# Altium footprint library SmartDoorLock.PcbLib: 9 footprints
Each footprint in its own frame and in the unit in brackets; x right, y up, seen from the top. Pads: shape width x height; smd on the part's side, far side on the other; paste and mask are expansions set on the pad; w line width, h text height; cw(c..) or ccw(c..) is an arc to the next point about the centre after c.
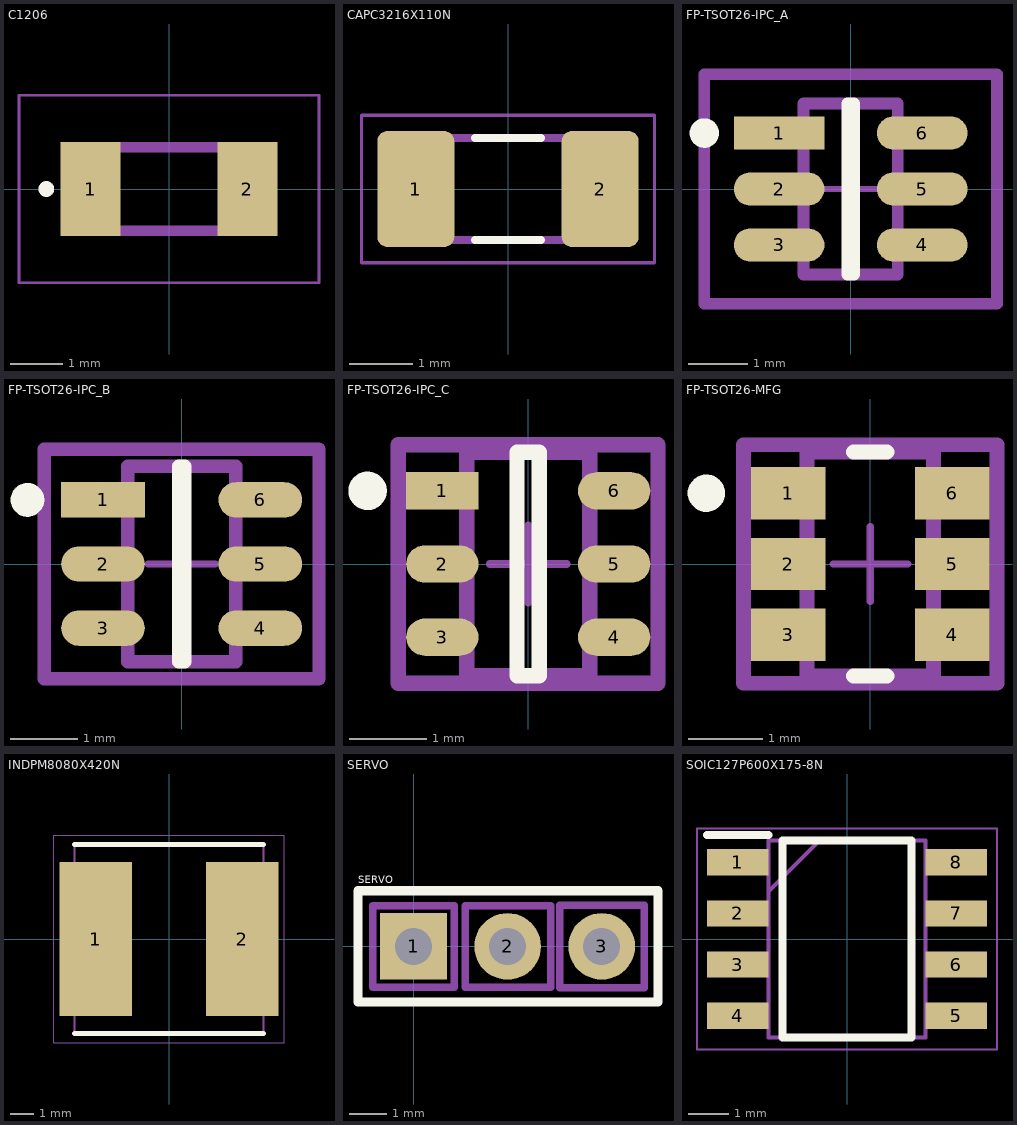
[diagram p0: the footprints below, top view; thin cyan lines are the x and y axes]

## C1206 [mm]
pads (2):
  rect 1.15x1.8 smd: 1(-1.5,0) 2(1.5,0)
Top Overlay:
  circle w0.2: c-2.35,0 r0.05
Top 3D Body:
  lines w0.2: -1.6,-0.8 -1.6,0.8 1.6,0.8 1.6,-0.8 -1.6,-0.8
Top Courtyard:
  lines w0.05: -2.875,-1.8 -2.875,1.8 2.875,1.8 2.875,-1.8 -2.875,-1.8
3D body "C1206C106M8PACTU.stp": height 1.8, standoff 0, extent -1.7,-0.9 1.7,0.9

## CAPC3216X110N [mm]
pads (2):
  rrect25% 1.21x1.82 smd: 1(-1.45,0) 2(1.45,0)
Top Overlay:
  lines w0.127: -0.52,-0.8 0.52,-0.8 ; -0.52,0.8 0.52,0.8
Top 3D Body:
  lines w0.127: -1.6,-0.8 1.6,-0.8 1.6,0.8 -1.6,0.8 -1.6,-0.8
Top Courtyard:
  lines w0.05: -2.305,-1.16 2.305,-1.16 2.305,1.16 -2.305,1.16 -2.305,-1.16
3D body "step_temp.STEP": height 0.85, standoff 0, extent -1.6,-0.8 1.6,0.8

## FP-TSOT26-IPC_A [mm]
pads (6):
  rect 1.54x0.566 smd paste+0 mask+0: 1(-1.216,0.95)
  rrect100% 1.54x0.566 smd paste+0 mask+0: 2(-1.216,0) 3(-1.216,-0.95) 4(1.216,-0.95) 5(1.216,0) 6(1.216,0.95)
Top Overlay:
  circle w0.25: c-2.485,0.95 r0.125
  lines w0.2: -0.054,-1.45 -0.054,1.45 0.054,1.45 0.054,-1.45 -0.054,-1.45
Top Assembly:
  lines w0.2: -2.485,-1.95 2.485,-1.95 2.485,1.95 -2.485,1.95 -2.485,-1.95
  text ".Designator" at 0,0.188 h1
Top 3D Body:
  lines w0.2: -0.8,-1.45 0.8,-1.45 0.8,1.45 -0.8,1.45 -0.8,-1.45
Top Courtyard:
  lines w0.2: -2.485,-1.95 2.485,-1.95 2.485,1.95 -2.485,1.95 -2.485,-1.95
Top Component Center:
  lines w0.1: -0.5,0 0.5,0 ; 0,-0.5 0,0.5
3D body "IC_Diodes_Inc_AP63201WU-7_eec.STEP": height 0.25, standoff 0, extent -2.485,-1.95 2.485,1.95

## FP-TSOT26-IPC_B [mm]
pads (6):
  rect 1.24x0.526 smd paste+0 mask+0: 1(-1.165,0.95)
  rrect100% 1.24x0.526 smd paste+0 mask+0: 2(-1.165,0) 3(-1.165,-0.95) 4(1.166,-0.95) 5(1.166,0) 6(1.166,0.95)
Top Overlay:
  circle w0.25: c-2.285,0.95 r0.125
  lines w0.2: -0.046,-1.45 0.046,-1.45 0.046,1.45 -0.046,1.45 -0.046,-1.45
Top Assembly:
  lines w0.2: -2.035,-1.7 2.035,-1.7 2.035,1.7 -2.035,1.7 -2.035,-1.7
  text ".Designator" at 0,0.188 h1
Top 3D Body:
  lines w0.2: -0.8,-1.45 0.8,-1.45 0.8,1.45 -0.8,1.45 -0.8,-1.45
Top Courtyard:
  lines w0.2: -2.035,-1.7 2.035,-1.7 2.035,1.7 -2.035,1.7 -2.035,-1.7
Top Component Center:
  lines w0.1: -0.5,0 0.5,0 ; 0,-0.5 0,0.5
3D body "IC_Diodes_Inc_AP63201WU-7_eec.STEP": height 0.25, standoff 0, extent -2.035,-1.7 2.035,1.7

## FP-TSOT26-IPC_C [mm]
pads (6):
  rect 0.94x0.486 smd paste+0 mask+0: 1(-1.115,0.95)
  rrect100% 0.94x0.486 smd paste+0 mask+0: 2(-1.115,0) 3(-1.115,-0.95) 4(1.116,-0.95) 5(1.116,0) 6(1.116,0.95)
Top Overlay:
  circle w0.25: c-2.085,0.95 r0.125
  lines w0.2: -0.146,-1.45 0.146,-1.45 0.146,1.45 -0.146,1.45 -0.146,-1.45
Top Assembly:
  lines w0.2: -1.685,-1.55 1.685,-1.55 1.685,1.55 -1.685,1.55 -1.685,-1.55
  text ".Designator" at 0,0.188 h1
Top 3D Body:
  lines w0.2: -0.8,-1.45 0.8,-1.45 0.8,1.45 -0.8,1.45 -0.8,-1.45
Top Courtyard:
  lines w0.2: -1.685,-1.55 1.685,-1.55 1.685,1.55 -1.685,1.55 -1.685,-1.55
Top Component Center:
  lines w0.1: -0.5,0 0.5,0 ; 0,-0.5 0,0.5
3D body "IC_Diodes_Inc_AP63201WU-7_eec.STEP": height 0.25, standoff 0, extent -1.685,-1.55 1.685,1.55

## FP-TSOT26-MFG [mm]
pads (6):
  rect 1x0.7 smd paste+0 mask+0: 1(-1.1,0.95) 2(-1.1,0) 3(-1.1,-0.95) 4(1.1,-0.95) 5(1.1,0) 6(1.1,0.95)
Top Overlay:
  circle w0.25: c-2.2,0.95 r0.125
  lines w0.2: -0.225,-1.5 0.225,-1.5 ; -0.225,1.5 0.225,1.5
Top Assembly:
  lines w0.2: -1.7,-1.6 -1.7,1.6 1.7,1.6 1.7,-1.6 -1.7,-1.6
  text ".Designator" at 0,0.188 h1
Top 3D Body:
  lines w0.2: -0.85,-1.5 -0.85,1.5 0.85,1.5 0.85,-1.5 -0.85,-1.5
Top Courtyard:
  lines w0.2: -1.7,-1.6 -1.7,1.6 1.7,1.6 1.7,-1.6 -1.7,-1.6
Top Component Center:
  lines w0.1: -0.5,0 0.5,0 ; 0,-0.5 0,0.5
3D body "IC_Diodes_Inc_AP63201WU-7_eec.STEP": height 0.25, standoff 0, extent -1.7,-1.6 1.7,1.6

## INDPM8080X420N [mm] "Power Inductors 10uH +/-20% 3.3A SMD,8.0x8.0x4.0mm RoHS"
pads (2):
  rect 3.05x6.5 smd: 1(-3.1,0) 2(3.1,0)
Top Overlay:
  lines w0.2: -4,-4 4,-4 ; -4,4 4,4
Top Courtyard:
  lines w0.1: -4,-4 -4,4 4,4 4,-4 -4,-4
Bottom Assembly:
  lines w0.05: -4.875,-4.4 -4.875,4.4 4.875,4.4 4.875,-4.4 -4.875,-4.4
3D body "SWPA8040S100MT.stp": height 4.2, standoff 0, extent -4,-4 4,4

## SERVO [mm]
pads (3):
  rect 1.8x1.8 hole 1: 1(0,0)
  round 1.8 hole 1: 2(2.54,0) 3(5.08,0)
Top Overlay:
  lines w0.254: -1.5,-1.5 6.6,-1.5 6.6,1.5 -1.5,1.5 -1.5,-1.5
  text "SERVO" at -1.5,1.7 h0.2
Mechanical 1:
  lines w0.2: -1.1,-1.1 1.1,-1.1 1.1,1.1 -1.1,1.1 -1.1,-1.1 ; 1.4,-1.1 3.7,-1.1 3.7,1.1 1.4,1.1 1.4,-1.1 ; 3.951,-1.117 6.232,-1.117 6.232,1.115 3.951,1.115 3.951,-1.117

## SOIC127P600X175-8N [mm]
pads (8):
  rect 1.525x0.65 smd: 1(-2.712,1.905) 2(-2.712,0.635) 3(-2.712,-0.635) 4(-2.712,-1.905) 5(2.712,-1.905) 6(2.712,-0.635) 7(2.712,0.635) 8(2.712,1.905)
Top Overlay:
  lines w0.2: -3.475,2.58 -1.95,2.58 ; -1.6,-2.45 -1.6,2.45 1.6,2.45 1.6,-2.45 -1.6,-2.45
Top 3D Body:
  lines w0.1: -1.95,1.18 -0.68,2.45 ; -1.95,-2.45 -1.95,2.45 1.95,2.45 1.95,-2.45 -1.95,-2.45
Top Courtyard:
  lines w0.05: -3.725,-2.75 -3.725,2.75 3.725,2.75 3.725,-2.75 -3.725,-2.75
3D body "NE555DR.stp": height 1.75, standoff 0, extent -3,-2.45 3,2.45